# Altium schematic symbol library 10uF caseA Tantalum.SchLib: 1 symbol
Pins are listed as number, name and electrical type; pins without a type are passive.

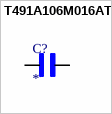
[diagram p0: symbol T491A106M016AT]

## T491A106M016AT
designator C?
Capacitor;Tantalum;Cap 10uF;Tol 20%;SMT;Vol-Rtg 16V;A Case Size;Tape and Reel | KEMET T491A106M016AT; SnapEDA_Link: https://www.snapeda.com/parts/T491A106M016AT/KEMET/view-part/?ref=snap; Package: SMD-2 KEMET; Value: *; MF: KEMET; MP: T491A106M016AT; Check_prices: https://www.snapeda.com/parts/T491A106M016AT/KEMET/view-part/?ref=eda
footprint RESC3216X125N
pins: 1, 2